# Altium schematic symbol library MountingHole.SchLib: 1 symbol
Pins are listed as number, name and electrical type; pins without a type are passive.

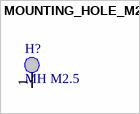
[diagram p0: symbol MOUNTING_HOLE_M2.5]

## MOUNTING_HOLE_M2.5
designator H?, comment MH M2.5
M2.5 mounting hole, Pi HAT pattern
footprint MH_M2.5_PLATED
pins: 1 MH